# Altium footprint library FT8.PcbLib: 40 footprints (part 3 of 3)
Each footprint in its own frame and in the unit in brackets; x right, y up, seen from the top. Pads: shape width x height; smd on the part's side, far side on the other; paste and mask are expansions set on the pad; w line width, h text height; cw(c..) or ccw(c..) is an arc to the next point about the centre after c.
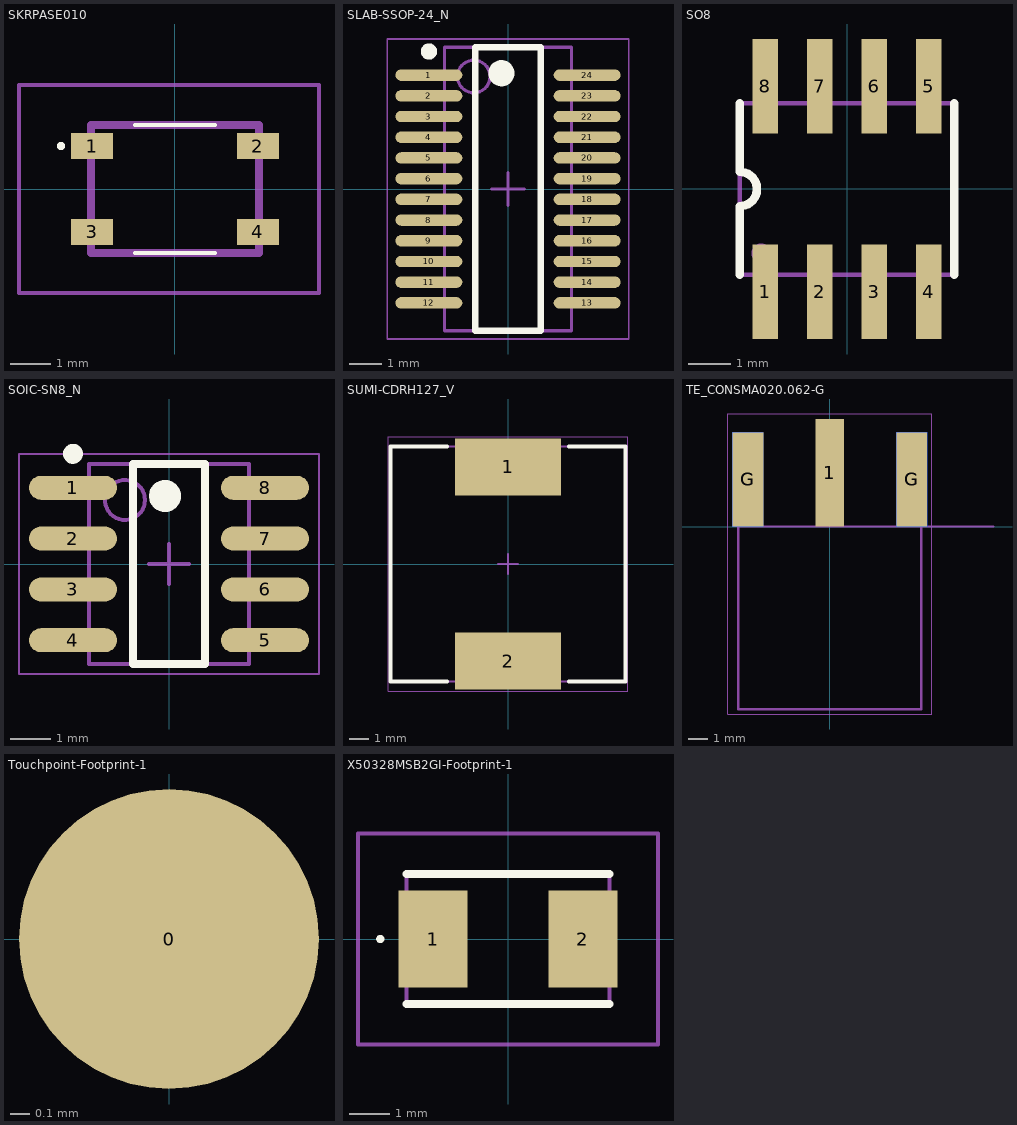
[diagram p2: the footprints below, top view; thin cyan lines are the x and y axes]

## SKRPASE010 [mm]
pads (4):
  rect 1.05x0.65 smd: 1(-2.075,1.075) 2(2.075,1.075) 3(-2.075,-1.075) 4(2.075,-1.075)
Top Overlay:
  lines w0.1: -1,-1.6 1,-1.6 ; -1,1.6 1,1.6 ; -2.9,1.075 ccw(c-2.85,1.075) -2.8,1.075 ccw(c-2.85,1.075) -2.9,1.075
Top Courtyard:
  lines w0.2: -2.1,-1.6 -2.1,1.6 2.1,1.6 2.1,-1.6 -2.1,-1.6
Mechanical 20:
  lines w0.1: -3.9,-2.6 -3.9,2.6 3.6,2.6 3.6,-2.6 -3.9,-2.6
3D body "SKRPASE010.stp": height 2.5, standoff 0, extent -2.3,-1.6 2.3,1.6

## SLAB-SSOP-24_N [mm] "SOP, 24-Leads, Body 8.7x3.9mm, Pitch 0.635mm, IPC Medium Density"
height 2
pads (24):
  oval 2.05x0.35 smd: 1(-2.425,3.492) 2(-2.425,2.857) 3(-2.425,2.222) 4(-2.425,1.587) 5(-2.425,0.953) 6(-2.425,0.318) 7(-2.425,-0.318) 8(-2.425,-0.953) 9(-2.425,-1.587) 10(-2.425,-2.222) 11(-2.425,-2.857) 12(-2.425,-3.492) 13(2.425,-3.492) 14(2.425,-2.857) 15(2.425,-2.222) 16(2.425,-1.587) 17(2.425,-0.953) 18(2.425,-0.318) 19(2.425,0.318) 20(2.425,0.953) 21(2.425,1.587) 22(2.425,2.222) 23(2.425,2.857) 24(2.425,3.492)
Top Overlay:
  circle w0.25: c-2.425,4.217 r0.125
  circle w0.4: c-0.2,3.55 r0.2
  lines w0.2: -1,-4.35 -1,4.35 1,4.35 1,-4.35 -1,-4.35
Top Assembly:
  circle w0.1: c-1.05,3.45 r0.5
  lines w0.1: -1.95,-4.35 -1.95,4.35 1.95,4.35 1.95,-4.35 -1.95,-4.35
Top Courtyard:
  lines w0.05: -3.7,-4.6 -3.7,4.6 3.7,4.6 3.7,-4.6 -3.7,-4.6
  lines w0.1: -0.5,0 0.5,0 ; 0,-0.5 0,0.5
3D body "SSOP24_SIL.step": height 2.01, standoff 0, extent -2.997,-4.331 2.997,4.331

## SO8 [mm]
pads (8):
  rect 0.6x2.2 smd: 1(-1.905,-2.4) 2(-0.635,-2.4) 3(0.635,-2.4) 4(1.905,-2.4) 5(1.905,2.4) 6(0.635,2.4) 7(-0.635,2.4) 8(-1.905,2.4)
Top Overlay:
  lines w0.2: -2.5,-0.4 ccw(c-2.5,0) -2.5,0.4 ; -2.5,-2 -2.5,-0.4 ; -2.5,0.4 -2.5,2 ; 2.5,-2 2.5,2
Bottom 3D Body:
  text ".Comment" at 0.05,-1.35 h0.8
Mechanical 7:
  text ".Designator" at 0.55,-0.8 h0.8
Top Courtyard:
  circle w0.254: c-2,-1.5 r0.1
  lines w0.1: -2.5,-2 2.5,-2 2.5,2 -2.5,2 -2.5,-2
3D body "SO8.step": height 1.7, standoff 0, extent -2.45,-3 2.45,3

## SOIC-SN8_N [mm] "SOIC, 8-Leads, Body 4.9x3.9mm, Pitch 1.27mm, IPC Medium Density"
height 1.75
pads (8):
  oval 2.2x0.6 smd: 1(-2.4,1.905) 2(-2.4,0.635) 3(-2.4,-0.635) 4(-2.4,-1.905) 5(2.4,-1.905) 6(2.4,-0.635) 7(2.4,0.635) 8(2.4,1.905)
Top Overlay:
  circle w0.25: c-2.4,2.755 r0.125
  circle w0.4: c-0.1,1.7 r0.2
  lines w0.2: -0.9,-2.5 -0.9,2.5 0.9,2.5 0.9,-2.5 -0.9,-2.5
Top Assembly:
  circle w0.1: c-1.1,1.6 r0.5
  lines w0.1: -2,-2.5 -2,2.5 2,2.5 2,-2.5 -2,-2.5
Top Courtyard:
  lines w0.05: -3.75,-2.75 -3.75,2.75 3.75,2.75 3.75,-2.75 -3.75,-2.75
  lines w0.1: -0.5,0 0.5,0 ; 0,-0.5 0,0.5
3D body: height 1.75, standoff 0.1, extent -2,-2.5 2,2.5

## SUMI-CDRH127_V [mm] "SMD, 2-Leads, Body 12x12mm"
height 8
pads (2):
  rect 5.4x2.9 smd: 1(0,4.95) 2(0,-4.95)
Top Overlay:
  lines w0.2: -3.1,-6 -6,-6 -6,6 -3.1,6 ; 3.1,-6 6,-6 6,6 3.1,6
Top Assembly:
  lines w0.1: -6,-6 -6,6 6,6 6,-6 -6,-6
Top Courtyard:
  lines w0.05: -6.1,-6.5 6.1,-6.5 6.1,6.5 -6.1,6.5 -6.1,-6.5
  lines w0.1: -0.5,0 0.5,0 ; 0,-0.5 0,0.5
3D body "User Library-CDRH127.STEP": height 8.4, standoff 0, extent -6,-6.1 6,6.1

## TE_CONSMA020.062-G [mm]
height 4.35
pads (5):
  rect 1.5x5.6 smd: 1(0,2.8)
  rect 1.6x4.9 smd: G(-4.26,2.45) G(4.26,2.45)
  rect 1.6x4.9 smd far side: G(-4.26,2.45) G(4.26,2.45)
Top Assembly:
  lines w0.127: 8.5,0 4.76,0 ; 4.76,0 -4.76,0 -4.76,-9.5 4.76,-9.5 4.76,0
  text "PCB EDGE" at 5.5,0.25 h1.02
Bottom Assembly:
  lines w0.127: -4.76,-9.5 4.76,-9.5 4.76,0 -4.76,0 -4.76,-9.5
Top Courtyard:
  lines w0.05: -5.31,-9.75 5.31,-9.75 5.31,5.85 -5.31,5.85 -5.31,-9.75
Bottom Courtyard:
  lines w0.05: -5.31,-9.75 5.31,-9.75 5.31,5.85 -5.31,5.85 -5.31,-9.75
3D body "step_temp.STEP": height 4.35, standoff -3.57, extent -4.76,-9.5 4.76,4.7

## Touchpoint-Footprint-1 [mil]
pads (1):
  round 60 smd: 0(0,0)

## X50328MSB2GI-Footprint-1 [mm]
pads (2):
  rect 1.7x2.4 smd: 1(-1.85,0) 2(1.85,0)
Top Overlay:
  lines w0.1: -3.2,0 cw(c-3.15,0) -3.1,0 cw(c-3.15,0) -3.2,0
  lines w0.2: -2.5,-1.6 2.5,-1.6 ; -2.5,1.6 2.5,1.6
Top Courtyard:
  lines w0.1: -2.5,-1.6 -2.5,1.6 2.5,1.6 2.5,-1.6 -2.5,-1.6
Mechanical 20:
  lines w0.1: -3.7,-2.6 -3.7,2.6 3.7,2.6 3.7,-2.6 -3.7,-2.6
3D body "AA-16.000MALE-T.stp": height 1.45, standoff 0, extent -2.53,-1.6 2.53,1.6